# Altium schematic symbol library Lab4_Altium_Files.SCHLIB: 90 symbols (part 2 of 2)
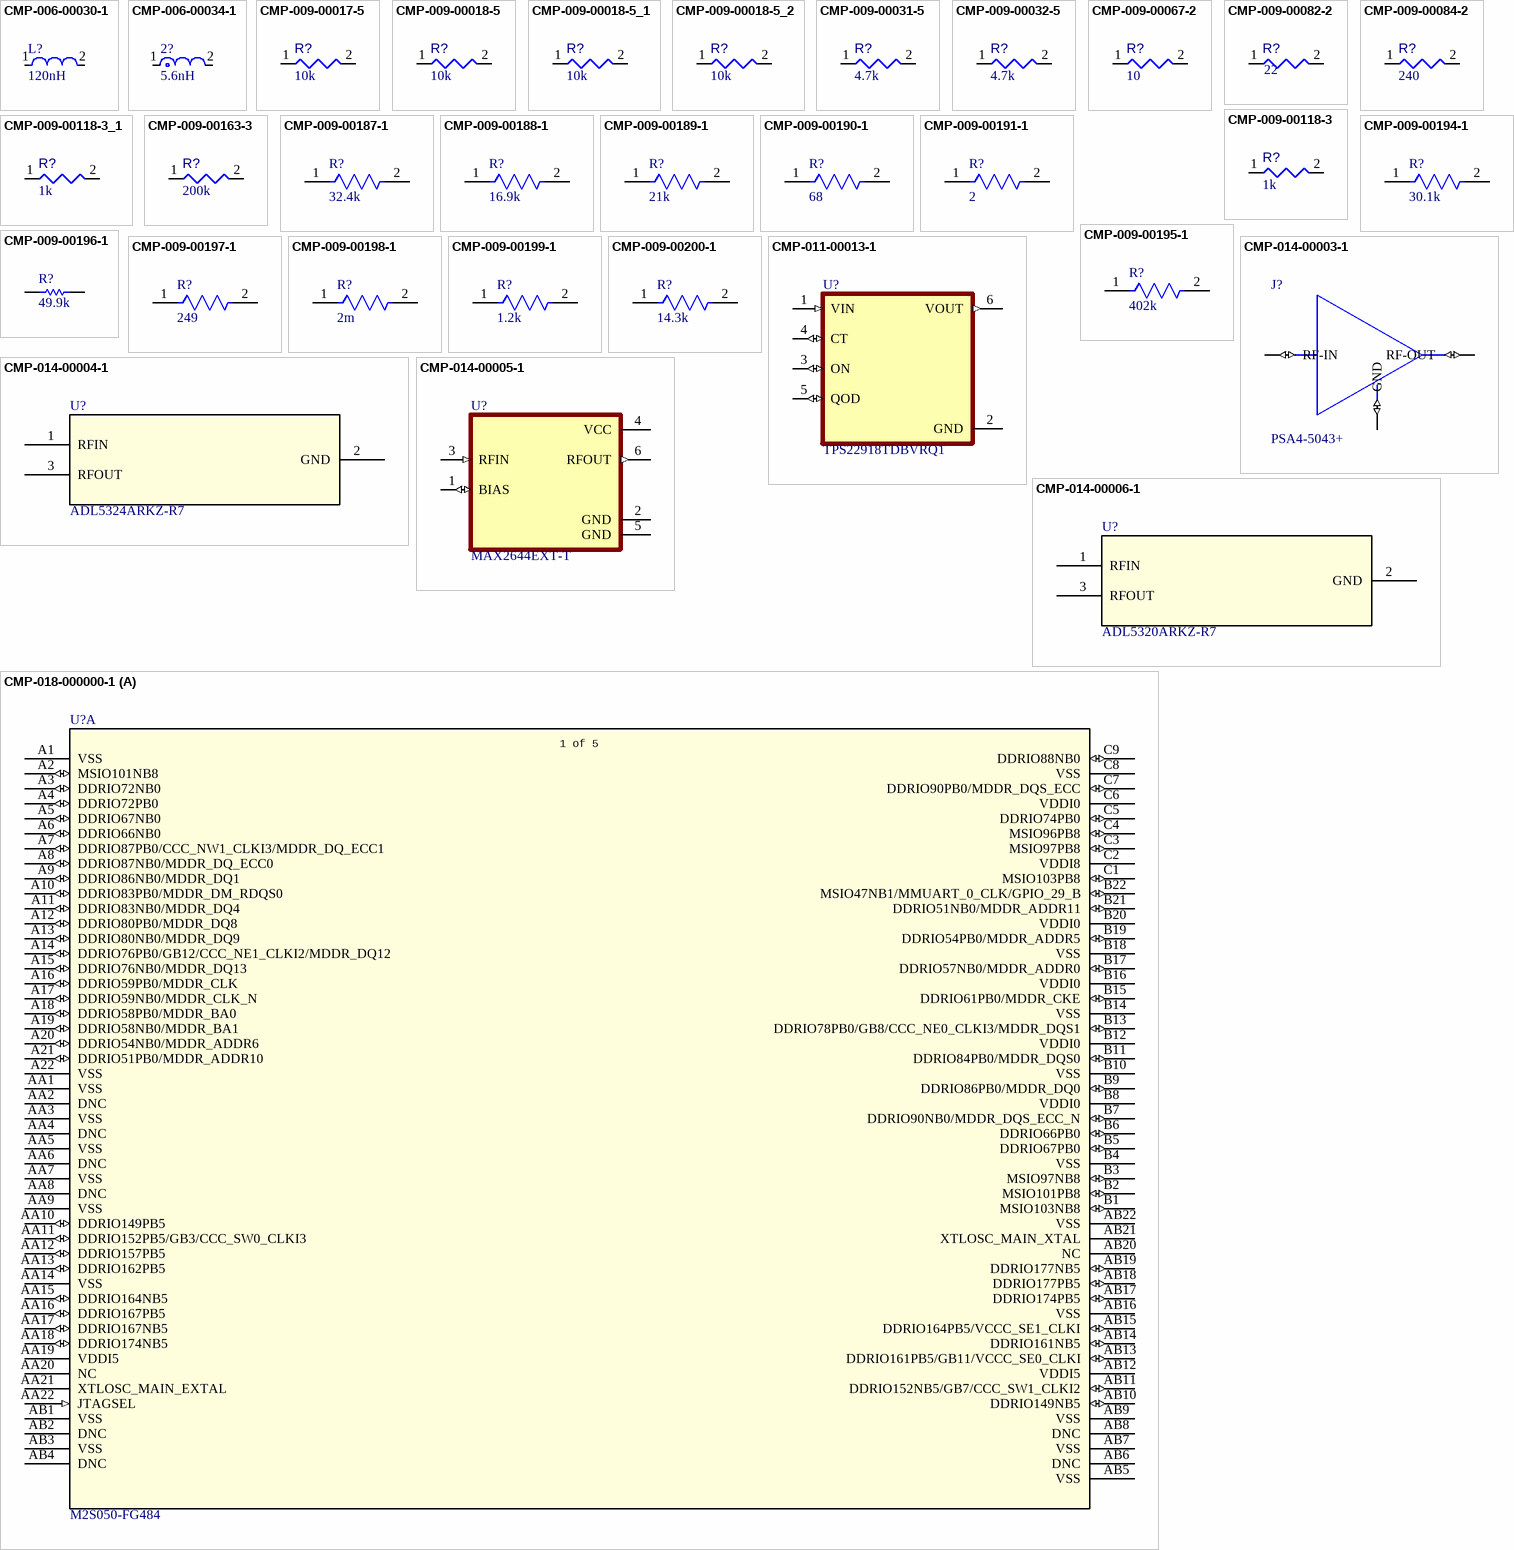
[diagram p8: symbols CMP-006-00030-1 to CMP-018-000000-1]

## CMP-009-00195-1
designator R?, comment value 402k  (hidden comment: res 402k 0805)
Fixed Resistor, Metal Glaze/Thick Film, 0.125W, 402000ohm, 150V, 1% +/-Tol, Surface Mount, 0805; Manufacturer Package Identifier: 0805 (2012 metric); Power Rating: 125mW; Temperature Coefficient: 100ppm/°C; Tolerance: 1%; Working Voltage: 150V; Ratings: AEC-Q200; Number of Terminations: 2; Max Operating Temperature: 155°C; Width: 1.25mm; Case Code (Metric): 2012; Case Code (Imperial): 0805; Mounting Technology: Surface Mount; Composition: Thick Film; Case/Package: 0805; Max Power Dissipation: 125mW; REACH SVHC: Unaffected; Lifecycle Status: Production; Min Operating Temperature: -55°C; RoHS: Compliant; Height: 500µm; Features: Automotive AEC-Q200, Moisture Resistant; Number of Terminals: 2; Length: 2mm; Export Control Classification Number (ECCN) Code: EAR99; China RoHS: Non-Compliant; Introduction Date: 2012-04-10; Harmonized Tariff Schedule (HTS) Code: 8533.21.00.30; Packaging: Tape & Reel; Termination: SMD/SMT; Voltage Rating: 150V; Country of Origin: Mainland China, Taiwan
footprint FP-AC0805-IPC_A
footprint FP-AC0805-IPC_C
footprint FP-AC0805-MFG
footprint FP-AC0805-IPC_B
pins: 1, 2

## CMP-009-00196-1
designator R?, comment value 49.9k  (hidden comment: res 49.9k)
Res Thick Film 0201 49.9K Ohm 1% 1/20W ±200ppm/°C Molded SMD SMD T/R; Manufacturer Lifecycle Status: ACTIVE; Part Series: Precision Thick Film Chip Resistors; Max Power Dissipation: 50mW; Voltage Rating: 25V; REACH SVHC: Unaffected; Radiation Hardening: No; Lifecycle Status: Production; Max Operating Temperature: 125°C; RoHS: Compliant; Case Code (Imperial): 0201; Composition: Thick Film; Lead Free: Lead Free; Working Voltage: 25V; Case/Package: 0201; Power Rating: 50mW; Tolerance: 1%; Termination: SMD/SMT; Mounting Technology: Surface Mount; Schedule B: 8533210045, 8533210045; Number of Terminations: 2; Temperature Coefficient: 200ppm/°C; Number of Terminals: 2; Length: 600µm; Min Operating Temperature: -55°C; Contact Plating: Tin; Case Code (Metric): 0603; Height: 230µm; Width: 300µm
footprint RESC0603X26X15NL03T05 (Chip Resistor, 2-Leads, Body 0.60x0.30mm, IPC Medium Density)
footprint RESC0603X26X15ML03T05 (Chip Resistor, 2-Leads, Body 0.60x0.30mm, IPC Low Density)
footprint RESC0603X26X15LL03T05 (Chip Resistor, 2-Leads, Body 0.60x0.30mm, IPC High Density)
pins: 1, 2
1 alternate drawing of the same symbol

## CMP-009-00197-1
designator R?, comment value 249  (hidden comment: res 249 0603)
100mW Thin Film Resistor 75V ±25ppm/℃ ±0.1% 249Ω 0603 Chip Resistor - Surface Mount ROHS; Temperature Coefficient: 25ppm/°C; Voltage Rating (DC): 50V; Case Code (Imperial): 0603; RoHS: Compliant; Max Operating Temperature: 155°C; Country of Origin: Mainland China, Taiwan; Mounting Technology: Surface Mount; Export Control Classification Number (ECCN) Code: EAR99; Introduction Date: 2008-06-09; Number of Terminations: 2; REACH SVHC: Unaffected; Tolerance: 0.1%; Depth: 800µm; Schedule B: 8533210045, 8533210045; Lifecycle Status: Production; Number of Terminals: 2; Working Voltage: 75V; Max Power Dissipation: 100mW; Radiation Hardening: No; Harmonized Tariff Schedule (HTS) Code: 8533.21.00.30; Military Standard: Not; Power Rating: 100mW; Height: 450µm; Contact Plating: Tin; Voltage Rating: 75V; Width: 800µm; Case/Package: 0603; Composition: Thin Film; China RoHS: Non-Compliant; Length: 1.6mm; Features: Moisture Resistant; Lead Free: Lead Free; Min Operating Temperature: -55°C; Termination: SMD/SMT
footprint FP-RT0603-IPC_C
footprint FP-RT0603-IPC_B
footprint FP-RT0603-IPC_A
footprint FP-RT0603-MFG
pins: 1, 2

## CMP-009-00198-1
designator R?, comment value 2m  (hidden comment: res 0.02 0603)
Res Thick Film 0603 0.02 Ohm 1% 0.125W ±300ppm/°C Molded SMD Paper T/R; Power Rating: 125mW; Working Voltage: 50mV; Temperature Coefficient: 300ppm/°C; Lead Free: Lead Free; Tolerance: 1%; Mounting Technology: Surface Mount; REACH SVHC: Unaffected; Packaging: Tape & Reel (TR); Case Code (Metric): 1608; Length: 1.6mm; Case/Package: 0603; Number of Terminations: 2; Height: 450µm; Min Operating Temperature: -55°C; Composition: Thick Film; Case Code (Imperial): 0603; RoHS: Compliant; Lifecycle Status: Production; Number of Terminals: 2; Schedule B: 8533210045, 8533210045; China RoHS: Non-Compliant; Width: 800µm; Max Power Dissipation: 125mW; Max Operating Temperature: 155°C
footprint FP-CSR0603-IPC_B
footprint FP-CSR0603-MFG
footprint FP-CSR0603-IPC_C
footprint FP-CSR0603-IPC_A
pins: 1, 2

## CMP-009-00199-1
designator R?, comment value 1.2k  (hidden comment: res 1.2k 0805)
Fixed Resistor, Metal Glaze/thick Film, 0.125W, 1200ohm, 500V, 1% +/-Tol, 100ppm/Cel, Surface Mount, 0805; Temperature Coefficient: 100ppm/°C; Voltage Rating: 150V; Power Rating: 125mW; Case/Package: 0805; Lifecycle Status: Production; Packaging: Tape & Reel; Working Voltage: 500V; Length: 2mm; Min Operating Temperature: -55°C; Tolerance: 1%; Introduction Date: 2017-10-02; Ratings: AEC-Q200; Height: 500µm; Export Control Classification Number (ECCN) Code: EAR99; Harmonized Tariff Schedule (HTS) Code: 8533.21.00.30; Composition: Thick Film; Number of Terminals: 2; RoHS: Compliant; Mounting Technology: Surface Mount; Max Operating Temperature: 155°C; REACH SVHC: Unaffected; China RoHS: Non-Compliant; Country of Origin: Mainland China, Taiwan; Width: 1.25mm
footprint FP-SR0805-MFG
footprint FP-SR0805-IPC_A
footprint FP-SR0805-IPC_B
footprint FP-SR0805-IPC_C
pins: 1, 2

## CMP-009-00200-1
designator R?, comment value 14.3k  (hidden comment: res 14.3k 0603)
Fixed Resistor, Thin Film, 0.1W, 14300ohm, 75V, 0.1% +/-Tol, 25ppm/Cel, Surface Mount, 0603; Temperature Coefficient: 25ppm/°C; Voltage Rating (DC): 50V; Power Rating: 100mW; Case/Package: 0603; Width: 800µm; Country of Origin: Mainland China, Taiwan; RoHS: Compliant; Mounting Technology: Surface Mount; Max Operating Temperature: 155°C; Tolerance: 0.1%; Height: 450µm; China RoHS: Non-Compliant; Introduction Date: 2008-06-09; Weight: 2.012816mg; Number of Terminations: 2; Case Code (Imperial): 0603; Min Operating Temperature: -55°C; Composition: Thin Film; Working Voltage: 75V; Voltage Rating: 75V; Termination: SMD/SMT; Export Control Classification Number (ECCN) Code: EAR99; Lifecycle Status: Production; Length: 1.6mm; REACH SVHC: Unaffected; Lead Free: Lead Free; Features: Moisture Resistant; Max Power Dissipation: 100mW; Harmonized Tariff Schedule (HTS) Code: 8533.21.00.30; Number of Terminals: 2
footprint FP-RT0603-IPC_C
footprint FP-RT0603-IPC_B
footprint FP-RT0603-IPC_A
footprint FP-RT0603-MFG
pins: 1, 2

## CMP-011-00013-1
designator U?, comment TPS22918TDBVRQ1
1-ch, 5.5-V, 2-A, 52-mÎ© automotive load switch with adj. rise time and adj. output discharg; MF: Texas Instruments; SnapEDA_Link: https://www.snapeda.com/parts/TPS22918TDBVRQ1/Texas+Instruments/view-part/?ref=snap; Source: TPS22918TDBVRQ1.SchLib; Pins: 6; Component Type: Standard; Value: *; Design Item ID: TPS22918TDBVRQ1; Case/Package: SOT-23-6 Texas Instruments; Check_prices: https://www.snapeda.com/parts/TPS22918TDBVRQ1/Texas+Instruments/view-part/?ref=eda; MP: TPS22918TDBVRQ1
footprint SOT95P280X145-6N
pins: 1 VIN (in), 2 GND (power), 3 ON (io), 4 CT (io), 5 QOD (io), 6 VOUT (out)

## CMP-014-00003-1
designator J?, comment PSA4-5043+
RF Amplifier IC Cellular, GSM, GPS, ISM, LTE, WCDMA, WiMAX, WLAN 50MHz ~ 4GHz MMM1362; MF: Mini-Circuits; Component Type: Standard; Design Item ID: PSA4-5043+; Pins: 4; Case/Package: None; SnapEDA_Link: https://www.snapeda.com/parts/PSA4-5043+/Mini-Circuits/view-part/?ref=snap; Source: PSA4-5043+.SchLib; Check_prices: https://www.snapeda.com/parts/PSA4-5043+/Mini-Circuits/view-part/?ref=eda; Value: *; MP: PSA4-5043+; Component Type: Amplifiers
footprint PSA4-5043+
pins: 1 RF-OUT (io), 2 GND (io), 3 RF-IN (io), 4 GND (io)

## CMP-014-00004-1
designator U?, comment ADL5324ARKZ-R7
400 MHz TO 4000 MHz Â½ Watt RF Driver Amplifier; Manufacturer_Name: Analog Devices Inc; Datasheet: https://www.analog.com/media/en/technical-documentation/data-sheets/ADL5324.pdf; Copyright: Copyright (C) 2026 Ultra Librarian. All rights reserved.; RefDes: RefDes; Manufacturer_Part_Number: ADL5324ARKZ-R7; Source: ADL5324ARKZ-R7.SchLib; Design Item ID: ADL5324ARKZ-R7; Type: Type
footprint RK_3_ADI
pins: 1 RFIN, 2 GND, 3 RFOUT

## CMP-014-00005-1
designator U?, comment MAX2644EXT-T
2.4GHz SiGe, High IP3 Low-Noise Amplifier; MF: Analog Devices; MP: MAX2644EXT+T; SnapEDA_Link: https://www.snapeda.com/parts/MAX2644EXT+T/Analog+Devices/view-part/?ref=snap; Source: MAX2644EXT-T.SchLib; Value: *; Check_prices: https://www.snapeda.com/parts/MAX2644EXT+T/Analog+Devices/view-part/?ref=eda; Case/Package: SC-70-6 Maxim; Design Item ID: MAX2644EXT-T; Component Type: Standard; Pins: 6
footprint SOT65P217X110-6N
pins: 1 BIAS (io), 2 GND (power), 3 RFIN (in), 4 VCC (power), 5 GND (power), 6 RFOUT (out)

## CMP-014-00006-1
designator U?, comment ADL5320ARKZ-R7
400 MHz TO 2700 MHz Â¼ Watt RF Driver Amplifier; Manufacturer_Name: Analog Devices Inc; Copyright: Copyright (C) 2026 Ultra Librarian. All rights reserved.; Source: ADL5320ARKZ-R7.SchLib; Type: Type; Design Item ID: ADL5320ARKZ-R7; RefDes: RefDes; Manufacturer_Part_Number: ADL5320ARKZ-R7
footprint RK_3_ADI
pins: 1 RFIN, 2 GND, 3 RFOUT

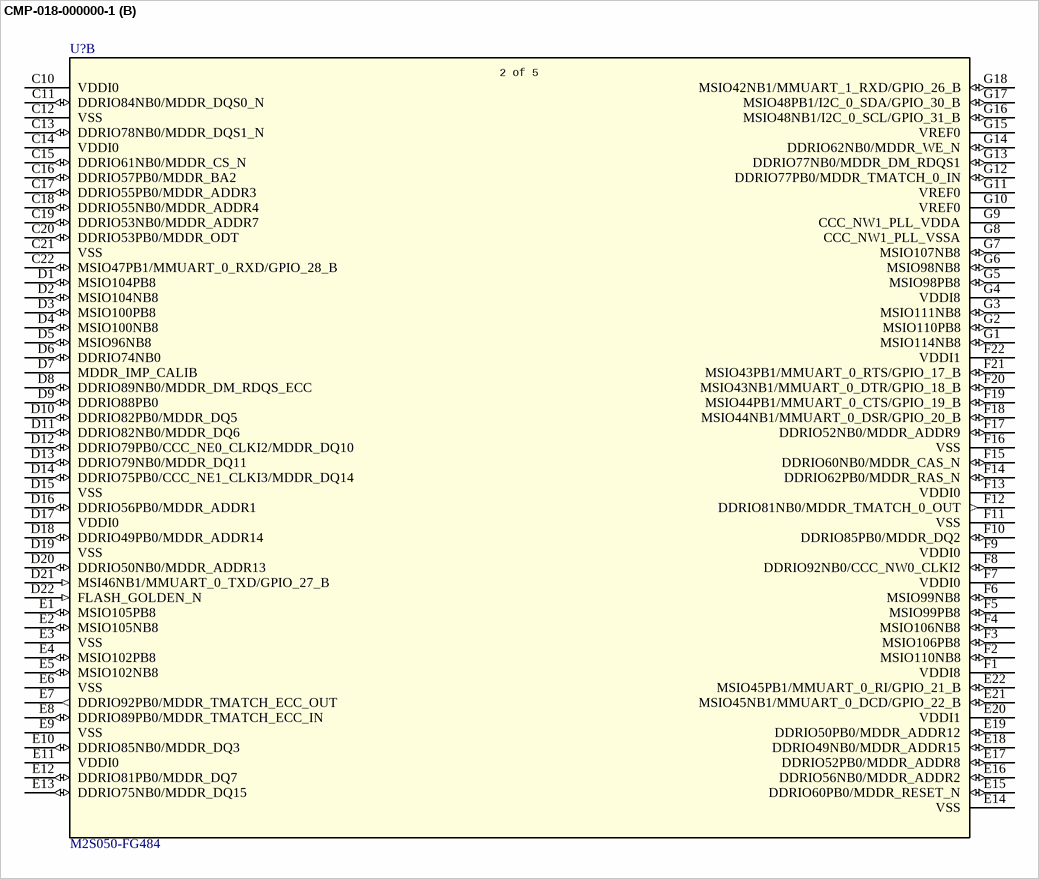
[diagram p2: symbol CMP-018-000000-1]

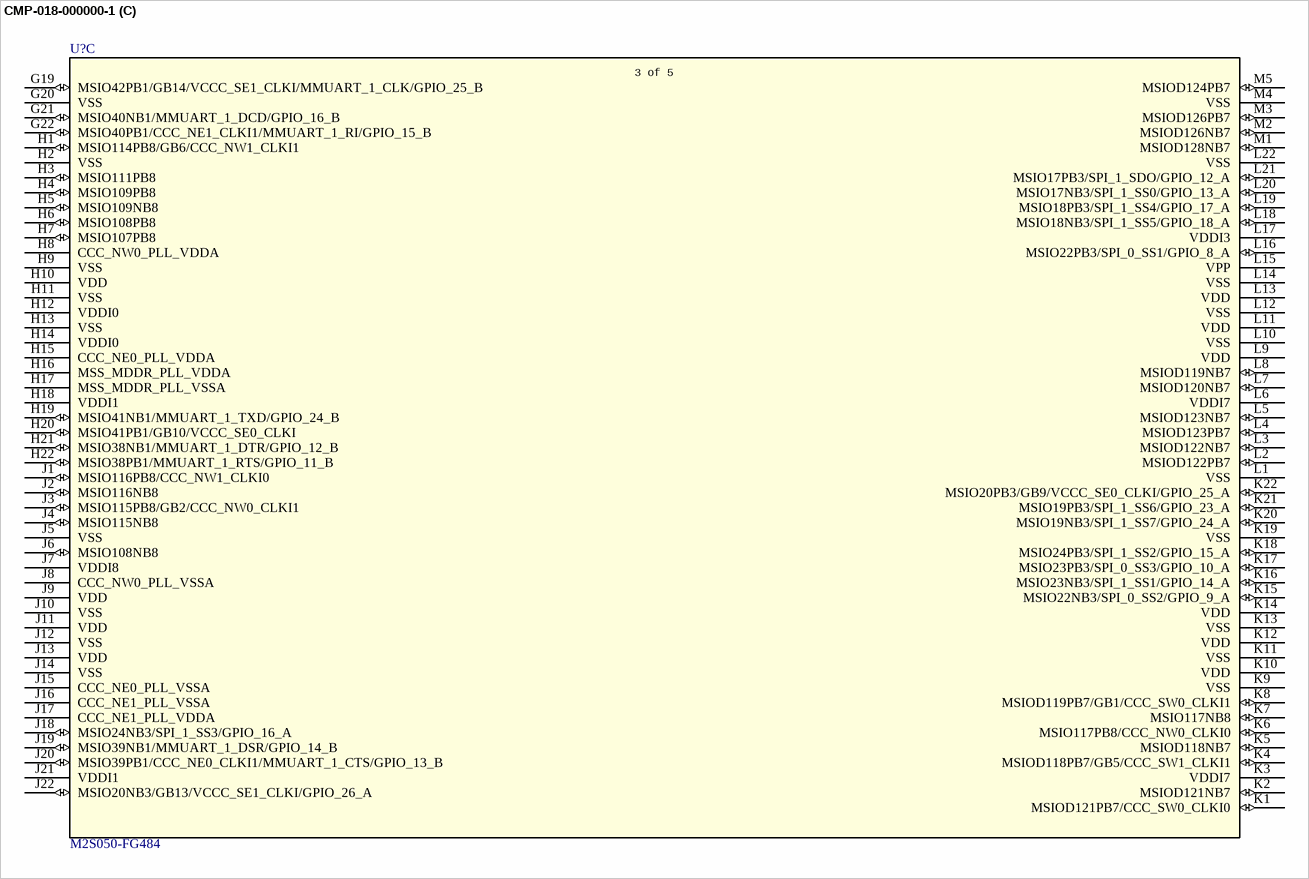
[diagram p3: symbol CMP-018-000000-1]

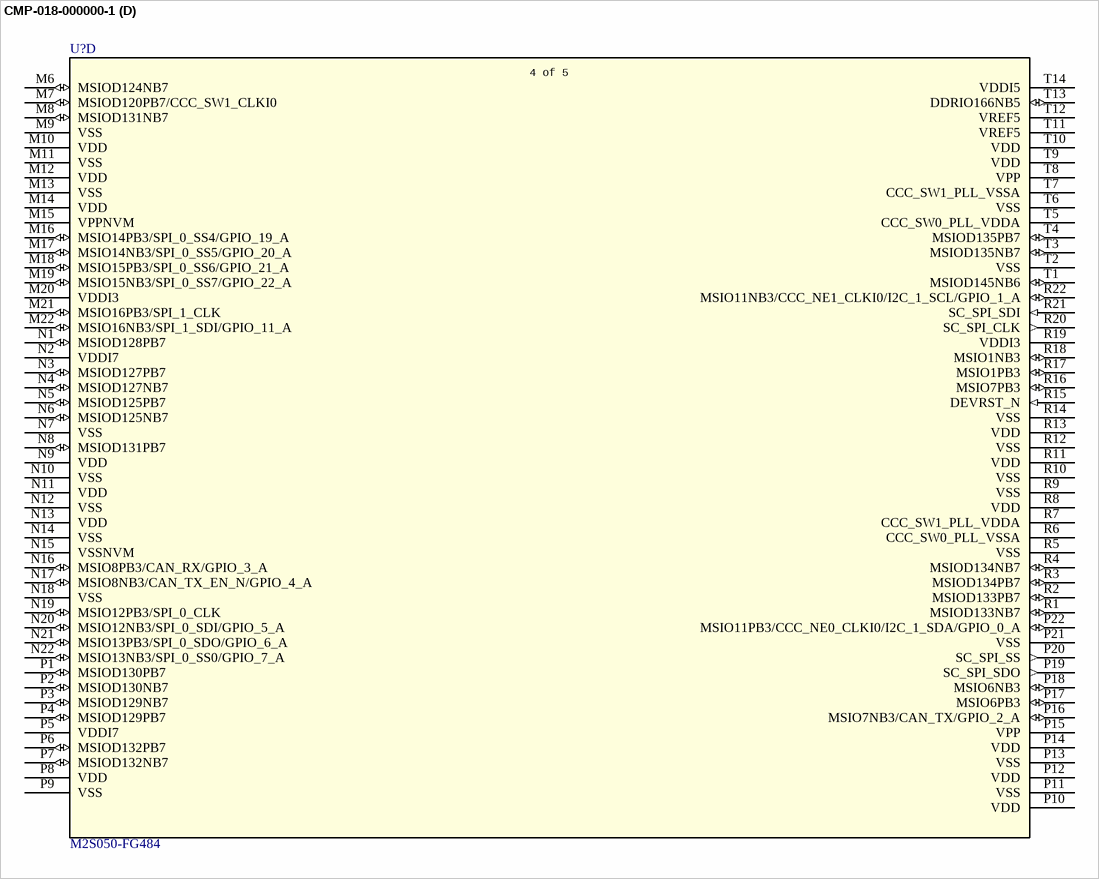
[diagram p4: symbol CMP-018-000000-1]

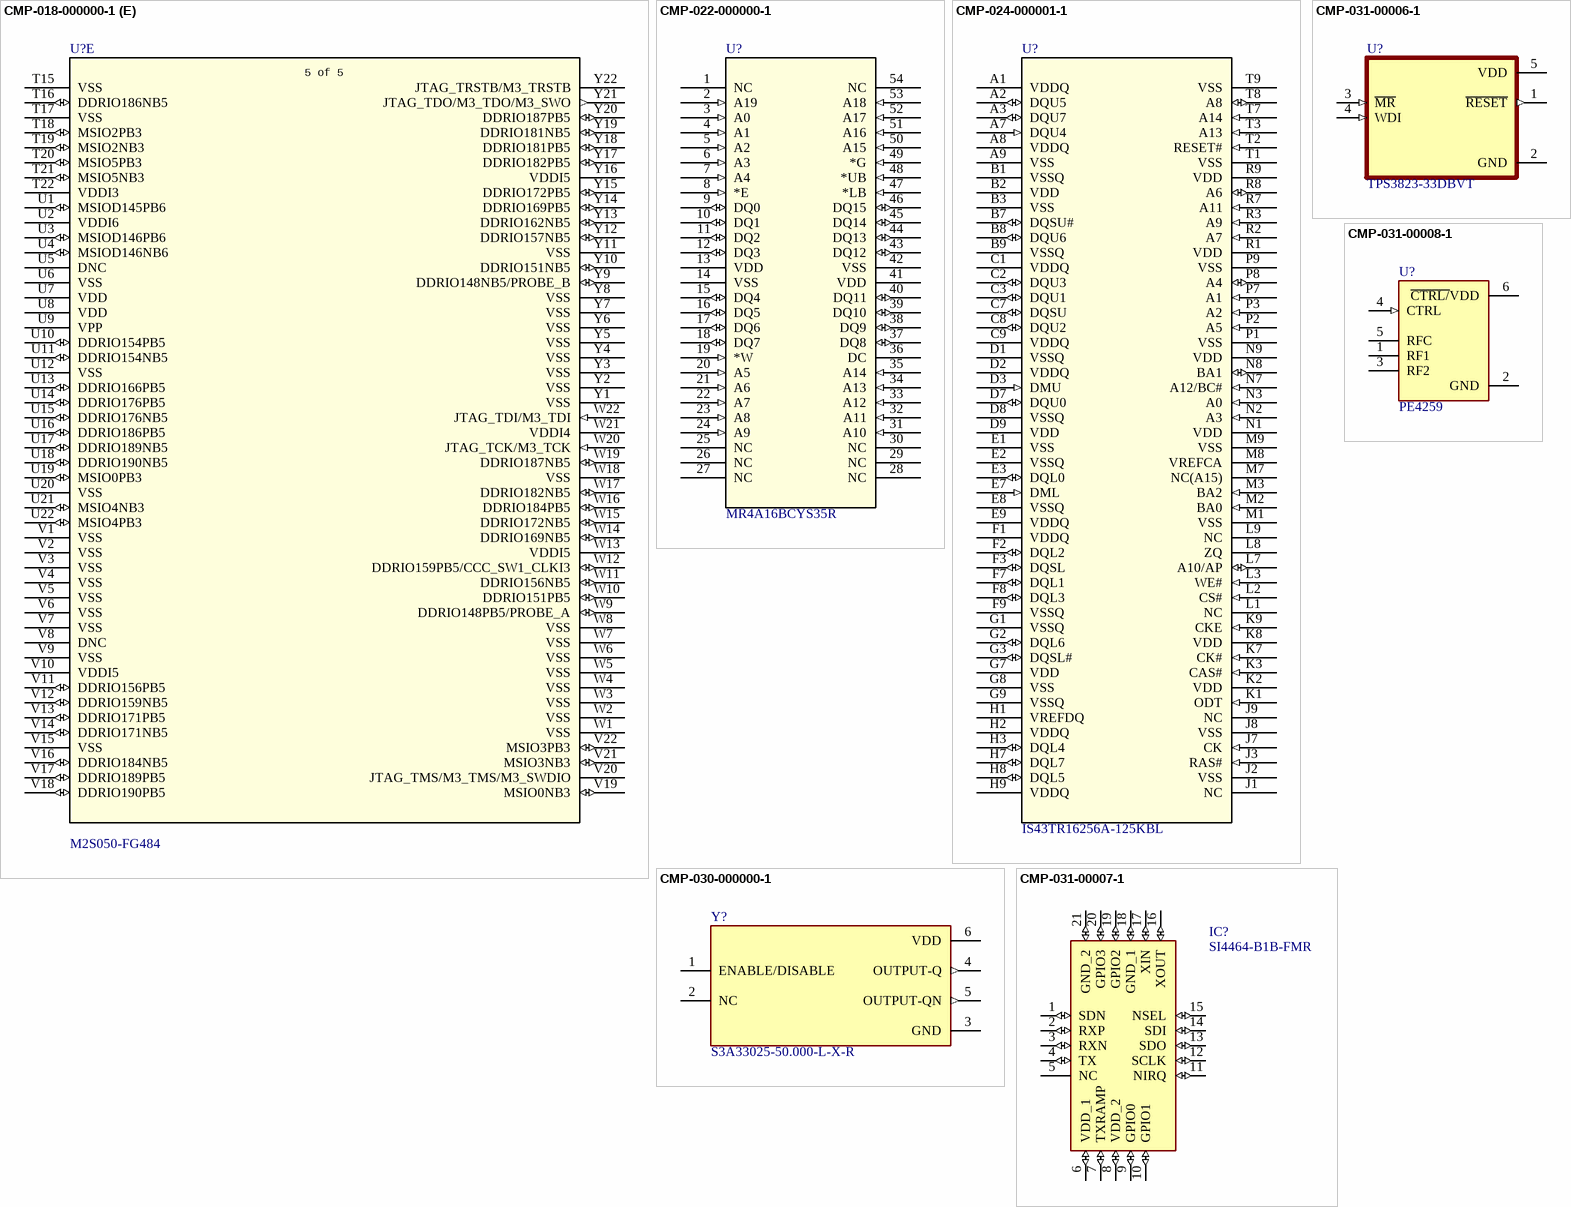
[diagram p5: symbols CMP-018-000000-1 to CMP-031-00008-1]

## CMP-018-000000-1
designator U?, comment M2S050-FG484
Description; Manufacturer_Name: Microchip; Design Item ID: M2S050-FG484; RefDes: RefDes; Copyright: Copyright (C) 2025 Ultra Librarian. All rights reserved.; Type: Embedded; Manufacturer_Part_Number: M2S050-FG484; Source: M2S050-FG484.SchLib
footprint FG484_MS-034_VAR_AAJ-1_MCH
part A pins: A1 VSS (power), A2 MSIO101NB8 (io), A3 DDRIO72NB0 (io), A4 DDRIO72PB0 (io), A5 DDRIO67NB0 (io), A6 DDRIO66NB0 (io), A7 DDRIO87PB0/CCC_NW1_CLKI3/MDDR_DQ_ECC1 (io), A8 DDRIO87NB0/MDDR_DQ_ECC0 (io), A9 DDRIO86NB0/MDDR_DQ1 (io), A10 DDRIO83PB0/MDDR_DM_RDQS0 (io), A11 DDRIO83NB0/MDDR_DQ4 (io), A12 DDRIO80PB0/MDDR_DQ8 (io), A13 DDRIO80NB0/MDDR_DQ9 (io), A14 DDRIO76PB0/GB12/CCC_NE1_CLKI2/MDDR_DQ12 (io), A15 DDRIO76NB0/MDDR_DQ13 (io), A16 DDRIO59PB0/MDDR_CLK (io), A17 DDRIO59NB0/MDDR_CLK_N (io), A18 DDRIO58PB0/MDDR_BA0 (io), A19 DDRIO58NB0/MDDR_BA1 (io), A20 DDRIO54NB0/MDDR_ADDR6 (io), A21 DDRIO51PB0/MDDR_ADDR10 (io), A22 VSS (power), AA1 VSS (power), AA2 DNC, AA3 VSS (power), AA4 DNC, AA5 VSS (power), AA6 DNC, AA7 VSS (power), AA8 DNC, AA9 VSS (power), AA10 DDRIO149PB5 (io), AA11 DDRIO152PB5/GB3/CCC_SW0_CLKI3 (io), AA12 DDRIO157PB5 (io), AA13 DDRIO162PB5 (io), AA14 VSS (power), AA15 DDRIO164NB5 (io), AA16 DDRIO167PB5 (io), AA17 DDRIO167NB5 (io), AA18 DDRIO174NB5 (io), AA19 VDDI5 (power), AA20 NC, AA21 XTLOSC_MAIN_EXTAL, AA22 JTAGSEL (in), AB1 VSS (power), AB2 DNC, AB3 VSS (power), AB4 DNC, AB5 VSS (power), AB6 DNC, AB7 VSS (power), AB8 DNC, AB9 VSS (power), AB10 DDRIO149NB5 (io), AB11 DDRIO152NB5/GB7/CCC_SW1_CLKI2 (io), AB12 VDDI5 (power), AB13 DDRIO161PB5/GB11/VCCC_SE0_CLKI (io), AB14 DDRIO161NB5 (io), AB15 DDRIO164PB5/VCCC_SE1_CLKI (io), AB16 VSS (power), AB17 DDRIO174PB5 (io), AB18 DDRIO177PB5 (io), AB19 DDRIO177NB5 (io), AB20 NC, AB21 XTLOSC_MAIN_XTAL, AB22 VSS (power), B1 MSIO103NB8 (io), B2 MSIO101PB8 (io), B3 MSIO97NB8 (io), B4 VSS (power), B5 DDRIO67PB0 (io), B6 DDRIO66PB0 (io), B7 DDRIO90NB0/MDDR_DQS_ECC_N (io), B8 VDDI0 (power), B9 DDRIO86PB0/MDDR_DQ0 (io), B10 VSS (power), B11 DDRIO84PB0/MDDR_DQS0 (io), B12 VDDI0 (power), B13 DDRIO78PB0/GB8/CCC_NE0_CLKI3/MDDR_DQS1 (io), B14 VSS (power), B15 DDRIO61PB0/MDDR_CKE (io), B16 VDDI0 (power), B17 DDRIO57NB0/MDDR_ADDR0 (io), B18 VSS (power), B19 DDRIO54PB0/MDDR_ADDR5 (io), B20 VDDI0 (power), B21 DDRIO51NB0/MDDR_ADDR11 (io), B22 MSIO47NB1/MMUART_0_CLK/GPIO_29_B (io), C1 MSIO103PB8 (io), C2 VDDI8 (power), C3 MSIO97PB8 (io), C4 MSIO96PB8 (io), C5 DDRIO74PB0 (io), C6 VDDI0 (power), C7 DDRIO90PB0/MDDR_DQS_ECC (io), C8 VSS (power), C9 DDRIO88NB0 (io)
part B pins: C10 VDDI0 (power), C11 DDRIO84NB0/MDDR_DQS0_N (io), C12 VSS (power), C13 DDRIO78NB0/MDDR_DQS1_N (io), C14 VDDI0 (power), C15 DDRIO61NB0/MDDR_CS_N (io), C16 DDRIO57PB0/MDDR_BA2 (io), C17 DDRIO55PB0/MDDR_ADDR3 (io), C18 DDRIO55NB0/MDDR_ADDR4 (io), C19 DDRIO53NB0/MDDR_ADDR7 (io), C20 DDRIO53PB0/MDDR_ODT (io), C21 VSS (power), C22 MSIO47PB1/MMUART_0_RXD/GPIO_28_B (io), D1 MSIO104PB8 (io), D2 MSIO104NB8 (io), D3 MSIO100PB8 (io), D4 MSIO100NB8 (io), D5 MSIO96NB8 (io), D6 DDRIO74NB0 (io), D7 MDDR_IMP_CALIB, D8 DDRIO89NB0/MDDR_DM_RDQS_ECC (io), D9 DDRIO88PB0 (io), D10 DDRIO82PB0/MDDR_DQ5 (io), D11 DDRIO82NB0/MDDR_DQ6 (io), D12 DDRIO79PB0/CCC_NE0_CLKI2/MDDR_DQ10 (io), D13 DDRIO79NB0/MDDR_DQ11 (io), D14 DDRIO75PB0/CCC_NE1_CLKI3/MDDR_DQ14 (io), D15 VSS (power), D16 DDRIO56PB0/MDDR_ADDR1 (io), D17 VDDI0 (power), D18 DDRIO49PB0/MDDR_ADDR14 (io), D19 VSS (power), D20 DDRIO50NB0/MDDR_ADDR13 (io), D21 MSI46NB1/MMUART_0_TXD/GPIO_27_B (in), D22 FLASH_GOLDEN_N (in), E1 MSIO105PB8 (io), E2 MSIO105NB8 (io), E3 VSS (power), E4 MSIO102PB8 (io), E5 MSIO102NB8 (io), E6 VSS (power), E7 DDRIO92PB0/MDDR_TMATCH_ECC_OUT (out), E8 DDRIO89PB0/MDDR_TMATCH_ECC_IN (io), E9 VSS (power), E10 DDRIO85NB0/MDDR_DQ3 (io), E11 VDDI0 (power), E12 DDRIO81PB0/MDDR_DQ7 (io), E13 DDRIO75NB0/MDDR_DQ15 (io), E14 VSS (power), E15 DDRIO60PB0/MDDR_RESET_N (io), E16 DDRIO56NB0/MDDR_ADDR2 (io), E17 DDRIO52PB0/MDDR_ADDR8 (io), E18 DDRIO49NB0/MDDR_ADDR15 (io), E19 DDRIO50PB0/MDDR_ADDR12 (io), E20 VDDI1 (power), E21 MSIO45NB1/MMUART_0_DCD/GPIO_22_B (io), E22 MSIO45PB1/MMUART_0_RI/GPIO_21_B (io), F1 VDDI8 (power), F2 MSIO110NB8 (io), F3 MSIO106PB8 (io), F4 MSIO106NB8 (io), F5 MSIO99PB8 (io), F6 MSIO99NB8 (io), F7 VDDI0 (power), F8 DDRIO92NB0/CCC_NW0_CLKI2 (io), F9 VDDI0 (power), F10 DDRIO85PB0/MDDR_DQ2 (io), F11 VSS (power), F12 DDRIO81NB0/MDDR_TMATCH_0_OUT (out), F13 VDDI0 (power), F14 DDRIO62PB0/MDDR_RAS_N (io), F15 DDRIO60NB0/MDDR_CAS_N (io), F16 VSS (power), F17 DDRIO52NB0/MDDR_ADDR9 (io), F18 MSIO44NB1/MMUART_0_DSR/GPIO_20_B (io), F19 MSIO44PB1/MMUART_0_CTS/GPIO_19_B (io), F20 MSIO43NB1/MMUART_0_DTR/GPIO_18_B (io), F21 MSIO43PB1/MMUART_0_RTS/GPIO_17_B (io), F22 VDDI1 (power), G1 MSIO114NB8 (io), G2 MSIO110PB8 (io), G3 MSIO111NB8 (io), G4 VDDI8 (power), G5 MSIO98PB8 (io), G6 MSIO98NB8 (io), G7 MSIO107NB8 (io), G8 CCC_NW1_PLL_VSSA (power), G9 CCC_NW1_PLL_VDDA (power), G10 VREF0 (power), G11 VREF0 (power), G12 DDRIO77PB0/MDDR_TMATCH_0_IN (io), G13 DDRIO77NB0/MDDR_DM_RDQS1 (io), G14 DDRIO62NB0/MDDR_WE_N (io), G15 VREF0 (power), G16 MSIO48NB1/I2C_0_SCL/GPIO_31_B (io), G17 MSIO48PB1/I2C_0_SDA/GPIO_30_B (io), G18 MSIO42NB1/MMUART_1_RXD/GPIO_26_B (io)
part C pins: G19 MSIO42PB1/GB14/VCCC_SE1_CLKI/MMUART_1_CLK/GPIO_25_B (io), G20 VSS (power), G21 MSIO40NB1/MMUART_1_DCD/GPIO_16_B (io), G22 MSIO40PB1/CCC_NE1_CLKI1/MMUART_1_RI/GPIO_15_B (io), H1 MSIO114PB8/GB6/CCC_NW1_CLKI1 (io), H2 VSS (power), H3 MSIO111PB8 (io), H4 MSIO109PB8 (io), H5 MSIO109NB8 (io), H6 MSIO108PB8 (io), H7 MSIO107PB8 (io), H8 CCC_NW0_PLL_VDDA (power), H9 VSS (power), H10 VDD (power), H11 VSS (power), H12 VDDI0 (power), H13 VSS (power), H14 VDDI0 (power), H15 CCC_NE0_PLL_VDDA (power), H16 MSS_MDDR_PLL_VDDA (power), H17 MSS_MDDR_PLL_VSSA (power), H18 VDDI1 (power), H19 MSIO41NB1/MMUART_1_TXD/GPIO_24_B (io), H20 MSIO41PB1/GB10/VCCC_SE0_CLKI (io), H21 MSIO38NB1/MMUART_1_DTR/GPIO_12_B (io), H22 MSIO38PB1/MMUART_1_RTS/GPIO_11_B (io), J1 MSIO116PB8/CCC_NW1_CLKI0 (io), J2 MSIO116NB8 (io), J3 MSIO115PB8/GB2/CCC_NW0_CLKI1 (io), J4 MSIO115NB8 (io), J5 VSS (power), J6 MSIO108NB8 (io), J7 VDDI8 (power), J8 CCC_NW0_PLL_VSSA (power), J9 VDD (power), J10 VSS (power), J11 VDD (power), J12 VSS (power), J13 VDD (power), J14 VSS (power), J15 CCC_NE0_PLL_VSSA (power), J16 CCC_NE1_PLL_VSSA (power), J17 CCC_NE1_PLL_VDDA (power), J18 MSIO24NB3/SPI_1_SS3/GPIO_16_A (io), J19 MSIO39NB1/MMUART_1_DSR/GPIO_14_B (io), J20 MSIO39PB1/CCC_NE0_CLKI1/MMUART_1_CTS/GPIO_13_B (io), J21 VDDI1 (power), J22 MSIO20NB3/GB13/VCCC_SE1_CLKI/GPIO_26_A (io), K1 MSIOD121PB7/CCC_SW0_CLKI0 (io), K2 MSIOD121NB7 (io), K3 VDDI7 (power), K4 MSIOD118PB7/GB5/CCC_SW1_CLKI1 (io), K5 MSIOD118NB7 (io), K6 MSIO117PB8/CCC_NW0_CLKI0 (io), K7 MSIO117NB8 (io), K8 MSIOD119PB7/GB1/CCC_SW0_CLKI1 (io), K9 VSS (power), K10 VDD (power), K11 VSS (power), K12 VDD (power), K13 VSS (power), K14 VDD (power), K15 MSIO22NB3/SPI_0_SS2/GPIO_9_A (io), K16 MSIO23NB3/SPI_1_SS1/GPIO_14_A (io), K17 MSIO23PB3/SPI_0_SS3/GPIO_10_A (io), K18 MSIO24PB3/SPI_1_SS2/GPIO_15_A (io), K19 VSS (power), K20 MSIO19NB3/SPI_1_SS7/GPIO_24_A (io), K21 MSIO19PB3/SPI_1_SS6/GPIO_23_A (io), K22 MSIO20PB3/GB9/VCCC_SE0_CLKI/GPIO_25_A (io), L1 VSS (power), L2 MSIOD122PB7 (io), L3 MSIOD122NB7 (io), L4 MSIOD123PB7 (io), L5 MSIOD123NB7 (io), L6 VDDI7 (power), L7 MSIOD120NB7 (io), L8 MSIOD119NB7 (io), L9 VDD (power), L10 VSS (power), L11 VDD (power), L12 VSS (power), L13 VDD (power), L14 VSS (power), L15 VPP (power), L16 MSIO22PB3/SPI_0_SS1/GPIO_8_A (io), L17 VDDI3 (power), L18 MSIO18NB3/SPI_1_SS5/GPIO_18_A (io), L19 MSIO18PB3/SPI_1_SS4/GPIO_17_A (io), L20 MSIO17NB3/SPI_1_SS0/GPIO_13_A (io), L21 MSIO17PB3/SPI_1_SDO/GPIO_12_A (io), L22 VSS (power), M1 MSIOD128NB7 (io), M2 MSIOD126NB7 (io), M3 MSIOD126PB7 (io), M4 VSS (power), M5 MSIOD124PB7 (io)
part D pins: M6 MSIOD124NB7 (io), M7 MSIOD120PB7/CCC_SW1_CLKI0 (io), M8 MSIOD131NB7 (io), M9 VSS (power), M10 VDD (power), M11 VSS (power), M12 VDD (power), M13 VSS (power), M14 VDD (power), M15 VPPNVM (power), M16 MSIO14PB3/SPI_0_SS4/GPIO_19_A (io), M17 MSIO14NB3/SPI_0_SS5/GPIO_20_A (io), M18 MSIO15PB3/SPI_0_SS6/GPIO_21_A (io), M19 MSIO15NB3/SPI_0_SS7/GPIO_22_A (io), M20 VDDI3 (power), M21 MSIO16PB3/SPI_1_CLK (io), M22 MSIO16NB3/SPI_1_SDI/GPIO_11_A (io), N1 MSIOD128PB7 (io), N2 VDDI7 (power), N3 MSIOD127PB7 (io), N4 MSIOD127NB7 (io), N5 MSIOD125PB7 (io), N6 MSIOD125NB7 (io), N7 VSS (power), N8 MSIOD131PB7 (io), N9 VDD (power), N10 VSS (power), N11 VDD (power), N12 VSS (power), N13 VDD (power), N14 VSS (power), N15 VSSNVM (power), N16 MSIO8PB3/CAN_RX/GPIO_3_A (io), N17 MSIO8NB3/CAN_TX_EN_N/GPIO_4_A (io), N18 VSS (power), N19 MSIO12PB3/SPI_0_CLK (io), N20 MSIO12NB3/SPI_0_SDI/GPIO_5_A (io), N21 MSIO13PB3/SPI_0_SDO/GPIO_6_A (io), N22 MSIO13NB3/SPI_0_SS0/GPIO_7_A (io), P1 MSIOD130PB7 (io), P2 MSIOD130NB7 (io), P3 MSIOD129NB7 (io), P4 MSIOD129PB7 (io), P5 VDDI7 (power), P6 MSIOD132PB7 (io), P7 MSIOD132NB7 (io), P8 VDD (power), P9 VSS (power), P10 VDD (power), P11 VSS (power), P12 VDD (power), P13 VSS (power), P14 VDD (power), P15 VPP (power), P16 MSIO7NB3/CAN_TX/GPIO_2_A (io), P17 MSIO6PB3 (io), P18 MSIO6NB3 (io), P19 SC_SPI_SDO (out), P20 SC_SPI_SS (out), P21 VSS (power), P22 MSIO11PB3/CCC_NE0_CLKI0/I2C_1_SDA/GPIO_0_A (io), R1 MSIOD133NB7 (io), R2 MSIOD133PB7 (io), R3 MSIOD134PB7 (io), R4 MSIOD134NB7 (io), R5 VSS (power), R6 CCC_SW0_PLL_VSSA (power), R7 CCC_SW1_PLL_VDDA (power), R8 VDD (power), R9 VSS (power), R10 VSS (power), R11 VDD (power), R12 VSS (power), R13 VDD (power), R14 VSS (power), R15 DEVRST_N (in), R16 MSIO7PB3 (io), R17 MSIO1PB3 (io), R18 MSIO1NB3 (io), R19 VDDI3 (power), R20 SC_SPI_CLK (out), R21 SC_SPI_SDI (in), R22 MSIO11NB3/CCC_NE1_CLKI0/I2C_1_SCL/GPIO_1_A (io), T1 MSIOD145NB6 (io), T2 VSS (power), T3 MSIOD135NB7 (io), T4 MSIOD135PB7 (io), T5 CCC_SW0_PLL_VDDA (power), T6 VSS (power), T7 CCC_SW1_PLL_VSSA (power), T8 VPP (power), T9 VDD (power), T10 VDD (power), T11 VREF5 (power), T12 VREF5 (power), T13 DDRIO166NB5 (io), T14 VDDI5 (power)
part E pins: T15 VSS (power), T16 DDRIO186NB5 (io), T17 VSS (power), T18 MSIO2PB3 (io), T19 MSIO2NB3 (io), T20 MSIO5PB3 (io), T21 MSIO5NB3 (io), T22 VDDI3 (power), U1 MSIOD145PB6 (io), U2 VDDI6 (power), U3 MSIOD146PB6 (io), U4 MSIOD146NB6 (io), U5 DNC, U6 VSS (power), U7 VDD (power), U8 VDD (power), U9 VPP (power), U10 DDRIO154PB5 (io), U11 DDRIO154NB5 (io), U12 VSS (power), U13 DDRIO166PB5 (io), U14 DDRIO176PB5 (io), U15 DDRIO176NB5 (io), U16 DDRIO186PB5 (io), U17 DDRIO189NB5 (io), U18 DDRIO190NB5 (io), U19 MSIO0PB3 (io), U20 VSS (power), U21 MSIO4NB3 (io), U22 MSIO4PB3 (io), V1 VSS (power), V2 VSS (power), V3 VSS (power), V4 VSS (power), V5 VSS (power), V6 VSS (power), V7 VSS (power), V8 DNC, V9 VSS (power), V10 VDDI5 (power), V11 DDRIO156PB5 (io), V12 DDRIO159NB5 (io), V13 DDRIO171PB5 (io), V14 DDRIO171NB5 (io), V15 VSS (power), V16 DDRIO184NB5 (io), V17 DDRIO189PB5 (io), V18 DDRIO190PB5 (io), V19 MSIO0NB3 (io), V20 JTAG_TMS/M3_TMS/M3_SWDIO, V21 MSIO3NB3 (io), V22 MSIO3PB3 (io), W1 VSS (power), W2 VSS (power), W3 VSS (power), W4 VSS (power), W5 VSS (power), W6 VSS (power), W7 VSS (power), W8 VSS (power), W9 DDRIO148PB5/PROBE_A (io), W10 DDRIO151PB5 (io), W11 DDRIO156NB5 (io), W12 DDRIO159PB5/CCC_SW1_CLKI3 (io), W13 VDDI5 (power), W14 DDRIO169NB5 (io), W15 DDRIO172NB5 (io), W16 DDRIO184PB5 (io), W17 DDRIO182NB5 (io), W18 VSS (power), W19 DDRIO187NB5 (io), W20 JTAG_TCK/M3_TCK (in), W21 VDDI4 (power), W22 JTAG_TDI/M3_TDI (in), Y1 VSS (power), Y2 VSS (power), Y3 VSS (power), Y4 VSS (power), Y5 VSS (power), Y6 VSS (power), Y7 VSS (power), Y8 VSS (power), Y9 DDRIO148NB5/PROBE_B (io), Y10 DDRIO151NB5 (io), Y11 VSS (power), Y12 DDRIO157NB5 (io), Y13 DDRIO162NB5 (io), Y14 DDRIO169PB5 (io), Y15 DDRIO172PB5 (io), Y16 VDDI5 (power), Y17 DDRIO182PB5 (io), Y18 DDRIO181PB5 (io), Y19 DDRIO181NB5 (io), Y20 DDRIO187PB5 (io), Y21 JTAG_TDO/M3_TDO/M3_SWO (out), Y22 JTAG_TRSTB/M3_TRSTB
part A text: 1 of 5
part B text: 2 of 5
part C text: 3 of 5
part D text: 4 of 5
part E text: 5 of 5

## CMP-022-000000-1
designator U?, comment MR4A16BCYS35R
No Description Available; Manufacturer_Name: Everspin; Copyright: Copyright (C) 2026 Ultra Librarian. All rights reserved.; Type: Type; Manufacturer_Part_Number: MR4A16BCYS35R; RefDes: RefDes; Design Item ID: MR4A16BCYS35R; Source: MR4A16BCYS35R.SchLib
footprint TSOP2-54_EVS
pins: 1 NC, 2 A19 (in), 3 A0 (in), 4 A1 (in), 5 A2 (in), 6 A3 (in), 7 A4 (in), 8 *E (in), 9 DQ0 (io), 10 DQ1 (io), 11 DQ2 (io), 12 DQ3 (io), 13 VDD (power), 14 VSS (power), 15 DQ4 (io), 16 DQ5 (io), 17 DQ6 (io), 18 DQ7 (io), 19 *W (in), 20 A5 (in), 21 A6 (in), 22 A7 (in), 23 A8 (in), 24 A9 (in), 25 NC, 26 NC, 27 NC, 28 NC, 29 NC, 30 NC, 31 A10 (in), 32 A11 (in), 33 A12 (in), 34 A13 (in), 35 A14 (in), 36 DC, 37 DQ8 (io), 38 DQ9 (io), 39 DQ10 (io), 40 DQ11 (io), 41 VDD (power), 42 VSS (power), 43 DQ12 (io), 44 DQ13 (io), 45 DQ14 (io), 46 DQ15 (io), 47 *LB (in), 48 *UB (in), 49 *G (in), 50 A15 (in), 51 A16 (in), 52 A17 (in), 53 A18 (in), 54 NC

## CMP-024-000001-1
designator U?, comment IS43TR16256A-125KBL
No Description Available; Manufacturer_Name: ISSI; Source: IS43TR16256A-125KBL.SchLib; Copyright: Copyright (C) 2026 Ultra Librarian. All rights reserved.; Type: Memory; Design Item ID: IS43TR16256A-125KBL; Manufacturer_Part_Number: IS43TR16256A-125KBL; RefDes: RefDes
footprint BGA96_IS43TR_ISI
pins: A1 VDDQ (power), A2 DQU5 (io), A3 DQU7 (io), A7 DQU4 (in), A8 VDDQ (power), A9 VSS (power), B1 VSSQ (power), B2 VDD (power), B3 VSS (power), B7 DQSU# (io), B8 DQU6 (io), B9 VSSQ (power), C1 VDDQ (power), C2 DQU3 (io), C3 DQU1 (io), C7 DQSU (io), C8 DQU2 (io), C9 VDDQ (power), D1 VSSQ (power), D2 VDDQ (power), D3 DMU (in), D7 DQU0 (io), D8 VSSQ (power), D9 VDD (power), E1 VSS (power), E2 VSSQ (power), E3 DQL0 (io), E7 DML (in), E8 VSSQ (power), E9 VDDQ (power), F1 VDDQ (power), F2 DQL2 (io), F3 DQSL (io), F7 DQL1 (io), F8 DQL3 (io), F9 VSSQ (power), G1 VSSQ (power), G2 DQL6 (io), G3 DQSL# (io), G7 VDD (power), G8 VSS (power), G9 VSSQ (power), H1 VREFDQ (power), H2 VDDQ (power), H3 DQL4 (io), H7 DQL7 (io), H8 DQL5 (io), H9 VDDQ (power), J1 NC, J2 VSS (power), J3 RAS# (in), J7 CK (in), J8 VSS (power), J9 NC, K1 ODT (in), K2 VDD (power), K3 CAS# (in), K7 CK# (in), K8 VDD (power), K9 CKE (in), L1 NC, L2 CS# (in), L3 WE# (in), L7 A10/AP (io), L8 ZQ (power), L9 NC, M1 VSS (power), M2 BA0 (in), M3 BA2 (in), M7 NC(A15), M8 VREFCA (power), M9 VSS (power), N1 VDD (power), N2 A3 (in), N3 A0 (in), N7 A12/BC# (in), N8 BA1 (io), N9 VDD (power), P1 VSS (power), P2 A5 (in), P3 A2 (in), P7 A1 (in), P8 A4 (io), P9 VSS (power), R1 VDD (power), R2 A7 (in), R3 A9 (in), R7 A11 (in), R8 A6 (io), R9 VDD (power), T1 VSS (power), T2 RESET# (in), T3 A13 (in), T7 A14 (in), T8 A8 (io), T9 VSS (power)

## CMP-030-000000-1
designator Y?, comment S3A33025-50.000-L-X-R
Component Type: Standard; Source: S3A33025-50.000-L-X-R.SchLib; MP: S3A33025-50.000-L-X-R; Value: *; Pin Count: 6; Design Item ID: S3A33025-50.000-L-X-R; Package: None; Price: None; Availability: Unavailable
footprint OSC_S3A33025-50.000-L-X-R
pins: 1 ENABLE/DISABLE, 2 NC, 3 GND (power), 4 OUTPUT-Q (out), 5 OUTPUT-QN (out), 6 VDD (power)

## CMP-031-00006-1
designator U?, comment TPS3823-33DBVT
Active-low, push-pull, voltage supervisor (reset IC) with 1.6-s watchdog & manual reset; MF: Texas Instruments; Case/Package: SOT-23-5 Texas Instruments; Value: *; SnapEDA_Link: https://www.snapeda.com/parts/TPS3823-33DBVT/Texas+Instruments/view-part/?ref=snap; Pins: 5; Check_prices: https://www.snapeda.com/parts/TPS3823-33DBVT/Texas+Instruments/view-part/?ref=eda; MP: TPS3823-33DBVT; Source: TPS3823-33DBVT.SchLib; Design Item ID: TPS3823-33DBVT; Component Type: Standard; Component Type: Integrated Circuits
footprint SOT95P280X145-5N
pins: 1 ~{RESET} (out), 2 GND (power), 3 ~{MR} (in), 4 WDI (in), 5 VDD (power)

## CMP-031-00007-1
designator IC?, comment SI4464-B1B-FMR
IC RF TxRx + MCU General ISM < 1GHz - 119MHz ~ 1.05GHz 20-VFQFN Exposed Pad; MF: Silicon Labs; Component Type: Standard; Pins: 21; Check_prices: https://www.snapeda.com/parts/SI4464-B1B-FMR/Silicon+Labs/view-part/?ref=eda; Case/Package: QFN-20 Silicon Labs; SnapEDA_Link: https://www.snapeda.com/parts/SI4464-B1B-FMR/Silicon+Labs/view-part/?ref=snap; Design Item ID: SI4464-B1B-FMR; Source: SI4464-B1B-FMR.SchLib; MP: SI4464-B1B-FMR; Value: *; Component Type: Integrated Circuits
footprint QFN50P400X400X90-21N
pins: 1 SDN (io), 2 RXP (io), 3 RXN (io), 4 TX (io), 5 NC, 6 VDD_1 (io), 7 TXRAMP (io), 8 VDD_2 (io), 9 GPIO0 (io), 10 GPIO1 (io), 11 NIRQ (io), 12 SCLK (io), 13 SDO (io), 14 SDI (io), 15 NSEL (io), 16 XOUT (io), 17 XIN (io), 18 GND_1 (io), 19 GPIO2 (io), 20 GPIO3 (io), 21 GND_2 (io)

## CMP-031-00008-1
designator U?, comment PE4259
RF Switch IC General Purpose SPDT 3 GHz 50Ohm SC-70-6; MF: pSemi; Pins: 6; Value: *; Check_prices: https://www.snapeda.com/parts/PE4259/pSemi/view-part/?ref=eda; Case/Package: SOT-363 Peregrine Semiconductor; SnapEDA_Link: https://www.snapeda.com/parts/PE4259/pSemi/view-part/?ref=snap; Source: PE4259.SchLib; MP: PE4259; Design Item ID: PE4259; Component Type: Standard
footprint SOT65P215X110-6N
pins: 1 RF1, 2 GND (power), 3 RF2, 4 CTRL (in), 5 RFC, 6 ~{CTRL/}VDD (power)

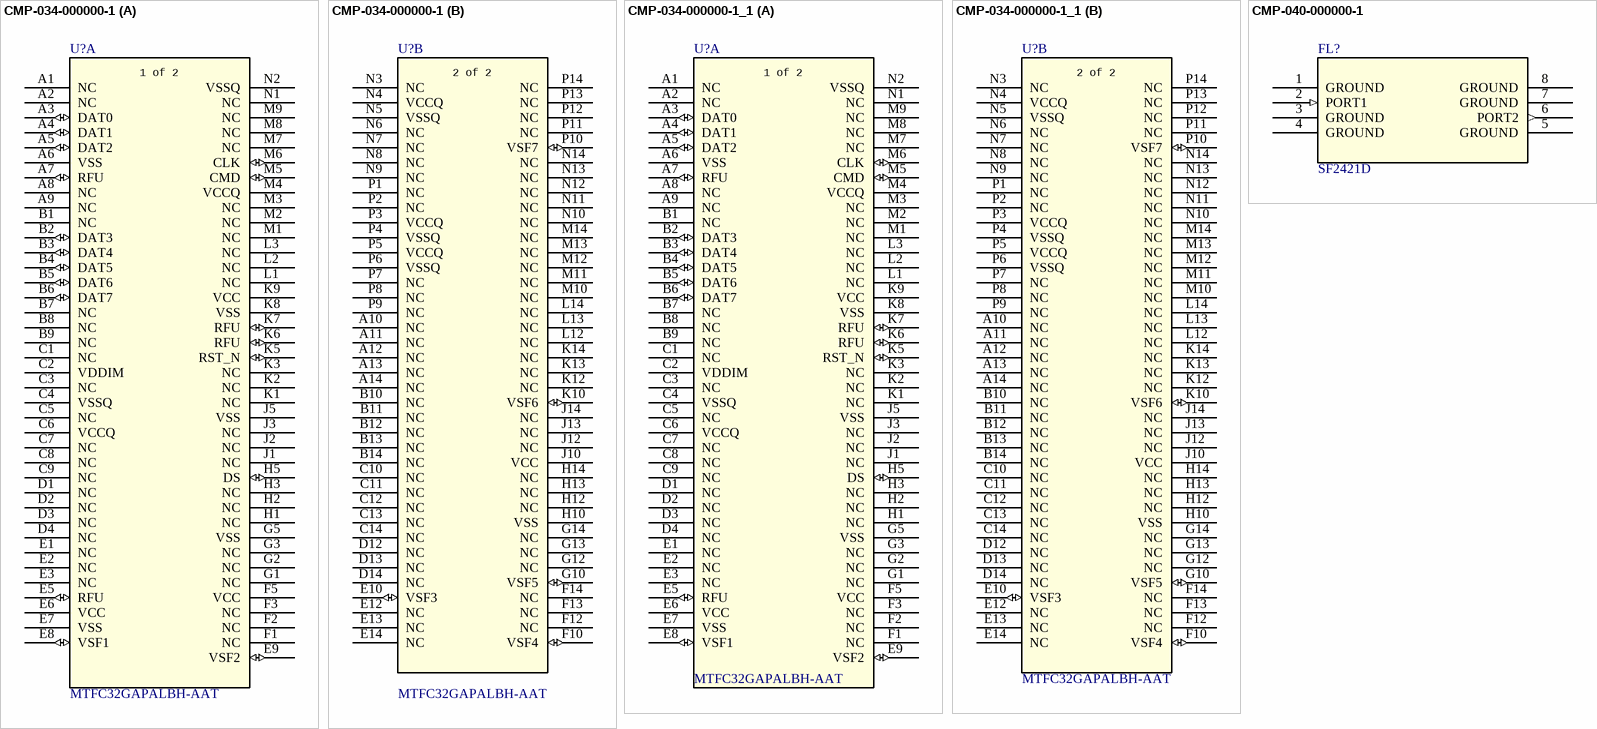
[diagram p6: symbols CMP-034-000000-1 to CMP-040-000000-1]

## CMP-034-000000-1
designator U?, comment MTFC32GAPALBH-AAT
No Description Available; Manufacturer_Name: Micron; Copyright: Copyright (C) 2026 Ultra Librarian. All rights reserved.; Type: Type; Manufacturer_Part_Number: MTFC32GAPALBH-AAT; RefDes: RefDes; Design Item ID: MTFC32GAPALBH-AAT; Source: MTFC32GAPALBH-AAT.SchLib
footprint TFBGA153_11P5X13_MRN
part A pins: A1 NC, A2 NC, A3 DAT0 (io), A4 DAT1 (io), A5 DAT2 (io), A6 VSS (power), A7 RFU (io), A8 NC, A9 NC, B1 NC, B2 DAT3 (io), B3 DAT4 (io), B4 DAT5 (io), B5 DAT6 (io), B6 DAT7 (io), B7 NC, B8 NC, B9 NC, C1 NC, C2 VDDIM (power), C3 NC, C4 VSSQ (power), C5 NC, C6 VCCQ (power), C7 NC, C8 NC, C9 NC, D1 NC, D2 NC, D3 NC, D4 NC, E1 NC, E2 NC, E3 NC, E5 RFU (io), E6 VCC (power), E7 VSS (power), E8 VSF1 (io), E9 VSF2 (io), F1 NC, F2 NC, F3 NC, F5 VCC (power), G1 NC, G2 NC, G3 NC, G5 VSS (power), H1 NC, H2 NC, H3 NC, H5 DS (io), J1 NC, J2 NC, J3 NC, J5 VSS (power), K1 NC, K2 NC, K3 NC, K5 RST_N (io), K6 RFU (io), K7 RFU (io), K8 VSS (power), K9 VCC (power), L1 NC, L2 NC, L3 NC, M1 NC, M2 NC, M3 NC, M4 VCCQ (power), M5 CMD (io), M6 CLK (io), M7 NC, M8 NC, M9 NC, N1 NC, N2 VSSQ (power)
part B pins: A10 NC, A11 NC, A12 NC, A13 NC, A14 NC, B10 NC, B11 NC, B12 NC, B13 NC, B14 NC, C10 NC, C11 NC, C12 NC, C13 NC, C14 NC, D12 NC, D13 NC, D14 NC, E10 VSF3 (io), E12 NC, E13 NC, E14 NC, F10 VSF4 (io), F12 NC, F13 NC, F14 NC, G10 VSF5 (io), G12 NC, G13 NC, G14 NC, H10 VSS (power), H12 NC, H13 NC, H14 NC, J10 VCC (power), J12 NC, J13 NC, J14 NC, K10 VSF6 (io), K12 NC, K13 NC, K14 NC, L12 NC, L13 NC, L14 NC, M10 NC, M11 NC, M12 NC, M13 NC, M14 NC, N3 NC, N4 VCCQ (power), N5 VSSQ (power), N6 NC, N7 NC, N8 NC, N9 NC, N10 NC, N11 NC, N12 NC, N13 NC, N14 NC, P1 NC, P2 NC, P3 VCCQ (power), P4 VSSQ (power), P5 VCCQ (power), P6 VSSQ (power), P7 NC, P8 NC, P9 NC, P10 VSF7 (io), P11 NC, P12 NC, P13 NC, P14 NC
part A text: 1 of 2
part B text: 2 of 2

## CMP-034-000000-1_1
designator U?, comment MTFC32GAPALBH-AAT
No Description Available; Manufacturer_Name: Micron; Copyright: Copyright (C) 2026 Ultra Librarian. All rights reserved.; Type: Type; Manufacturer_Part_Number: MTFC32GAPALBH-AAT; RefDes: RefDes; Design Item ID: MTFC32GAPALBH-AAT; Source: MTFC32GAPALBH-AAT.SchLib
footprint TFBGA153_11P5X13_MRN
part A pins: A1 NC, A2 NC, A3 DAT0 (io), A4 DAT1 (io), A5 DAT2 (io), A6 VSS (power), A7 RFU (io), A8 NC, A9 NC, B1 NC, B2 DAT3 (io), B3 DAT4 (io), B4 DAT5 (io), B5 DAT6 (io), B6 DAT7 (io), B7 NC, B8 NC, B9 NC, C1 NC, C2 VDDIM (power), C3 NC, C4 VSSQ (power), C5 NC, C6 VCCQ (power), C7 NC, C8 NC, C9 NC, D1 NC, D2 NC, D3 NC, D4 NC, E1 NC, E2 NC, E3 NC, E5 RFU (io), E6 VCC (power), E7 VSS (power), E8 VSF1 (io), E9 VSF2 (io), F1 NC, F2 NC, F3 NC, F5 VCC (power), G1 NC, G2 NC, G3 NC, G5 VSS (power), H1 NC, H2 NC, H3 NC, H5 DS (io), J1 NC, J2 NC, J3 NC, J5 VSS (power), K1 NC, K2 NC, K3 NC, K5 RST_N (io), K6 RFU (io), K7 RFU (io), K8 VSS (power), K9 VCC (power), L1 NC, L2 NC, L3 NC, M1 NC, M2 NC, M3 NC, M4 VCCQ (power), M5 CMD (io), M6 CLK (io), M7 NC, M8 NC, M9 NC, N1 NC, N2 VSSQ (power)
part B pins: A10 NC, A11 NC, A12 NC, A13 NC, A14 NC, B10 NC, B11 NC, B12 NC, B13 NC, B14 NC, C10 NC, C11 NC, C12 NC, C13 NC, C14 NC, D12 NC, D13 NC, D14 NC, E10 VSF3 (io), E12 NC, E13 NC, E14 NC, F10 VSF4 (io), F12 NC, F13 NC, F14 NC, G10 VSF5 (io), G12 NC, G13 NC, G14 NC, H10 VSS (power), H12 NC, H13 NC, H14 NC, J10 VCC (power), J12 NC, J13 NC, J14 NC, K10 VSF6 (io), K12 NC, K13 NC, K14 NC, L12 NC, L13 NC, L14 NC, M10 NC, M11 NC, M12 NC, M13 NC, M14 NC, N3 NC, N4 VCCQ (power), N5 VSSQ (power), N6 NC, N7 NC, N8 NC, N9 NC, N10 NC, N11 NC, N12 NC, N13 NC, N14 NC, P1 NC, P2 NC, P3 VCCQ (power), P4 VSSQ (power), P5 VCCQ (power), P6 VSSQ (power), P7 NC, P8 NC, P9 NC, P10 VSF7 (io), P11 NC, P12 NC, P13 NC, P14 NC
part A text: 1 of 2
part B text: 2 of 2

## CMP-040-000000-1
designator FL?, comment SF2421D
No Description Available; Manufacturer_Name: RFMi; Source: SF2421D.SchLib; RefDes: RefDes; Copyright: Copyright (C) 2026 Ultra Librarian. All rights reserved.; Type: SAW Filters; Design Item ID: SF2421D; Manufacturer_Part_Number: SF2421D; Component Type: Filters
footprint SM3838-8_RFI
pins: 1 GROUND (power), 2 PORT1 (in), 3 GROUND (power), 4 GROUND (power), 5 GROUND (power), 6 PORT2 (out), 7 GROUND (power), 8 GROUND (power)

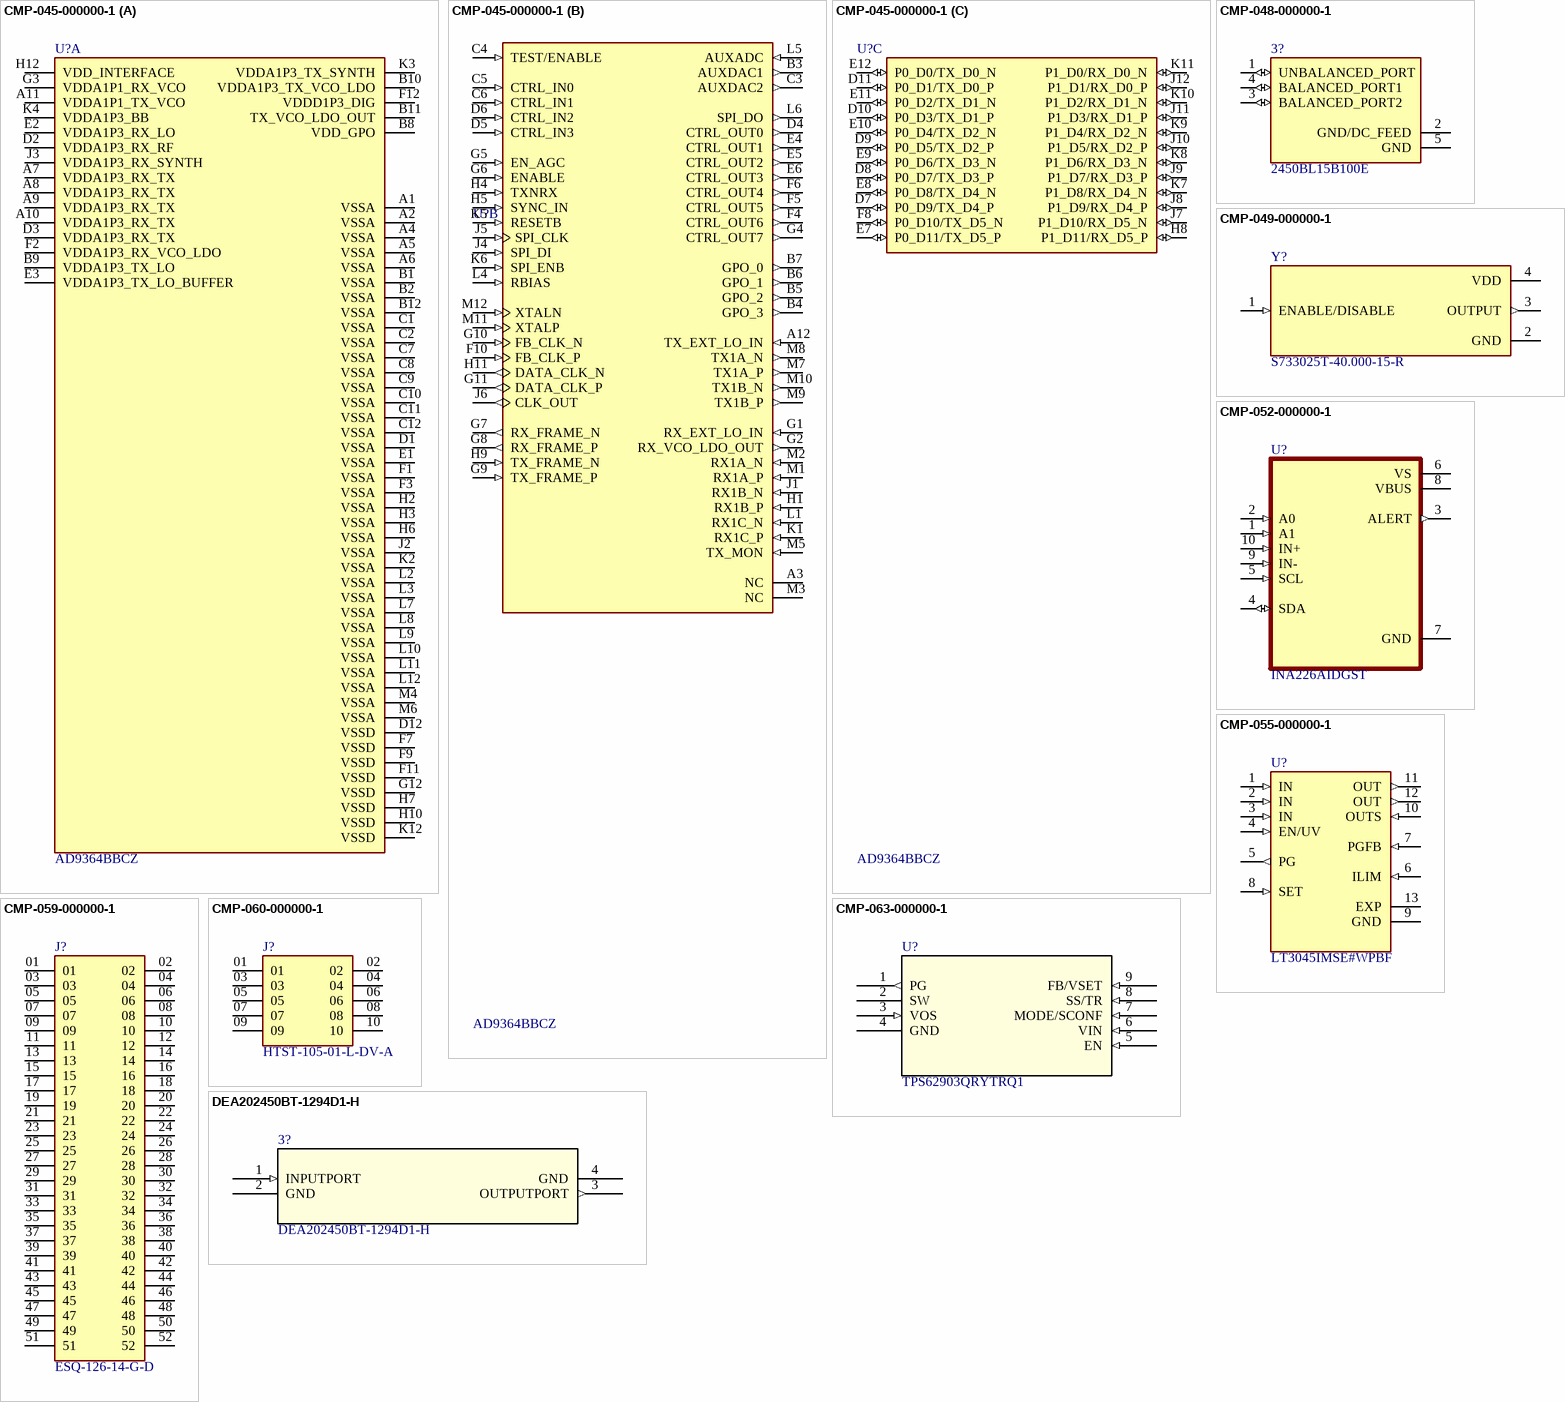
[diagram p7: symbols CMP-045-000000-1 to DEA202450BT-1294D1-H]

## CMP-045-000000-1
designator U?, comment AD9364BBCZ
1 x 1 RF Agile Transceiver; MF: Analog Devices; Component Type: Standard; SnapEDA_Link: https://www.snapeda.com/parts/AD9364BBCZ/Analog+Devices/view-part/?ref=snap; Check_prices: https://www.snapeda.com/parts/AD9364BBCZ/Analog+Devices/view-part/?ref=eda; Pin Count: 144; Value: *; Package: CSPBGA -144 Analog Devices; Design Item ID: AD9364BBCZ; MP: AD9364BBCZ; Source: AD9364BBCZ.SchLib
footprint BGA144C80P12X12_1000X1000X170N
part A pins: A1 VSSA (power), A2 VSSA (power), A4 VSSA (power), A5 VSSA (power), A6 VSSA (power), A7 VDDA1P3_RX_TX (power), A8 VDDA1P3_RX_TX (power), A9 VDDA1P3_RX_TX (power), A10 VDDA1P3_RX_TX (power), A11 VDDA1P1_TX_VCO (power), B1 VSSA (power), B2 VSSA (power), B8 VDD_GPO (power), B9 VDDA1P3_TX_LO (power), B10 VDDA1P3_TX_VCO_LDO (power), B11 TX_VCO_LDO_OUT (power), B12 VSSA (power), C1 VSSA (power), C2 VSSA (power), C7 VSSA (power), C8 VSSA (power), C9 VSSA (power), C10 VSSA (power), C11 VSSA (power), C12 VSSA (power), D1 VSSA (power), D2 VDDA1P3_RX_RF (power), D3 VDDA1P3_RX_TX (power), D12 VSSD (power), E1 VSSA (power), E2 VDDA1P3_RX_LO (power), E3 VDDA1P3_TX_LO_BUFFER (power), F1 VSSA (power), F2 VDDA1P3_RX_VCO_LDO (power), F3 VSSA (power), F7 VSSD (power), F9 VSSD (power), F11 VSSD (power), F12 VDDD1P3_DIG (power), G3 VDDA1P1_RX_VCO (power), G12 VSSD (power), H2 VSSA (power), H3 VSSA (power), H6 VSSA (power), H7 VSSD (power), H10 VSSD (power), H12 VDD_INTERFACE (power), J2 VSSA (power), J3 VDDA1P3_RX_SYNTH (power), K2 VSSA (power), K3 VDDA1P3_TX_SYNTH (power), K4 VDDA1P3_BB (power), K12 VSSD (power), L2 VSSA (power), L3 VSSA (power), L7 VSSA (power), L8 VSSA (power), L9 VSSA (power), L10 VSSA (power), L11 VSSA (power), L12 VSSA (power), M4 VSSA (power), M6 VSSA (power)
part B pins: A3 NC, A12 TX_EXT_LO_IN (in), B3 AUXDAC1 (out), B4 GPO_3 (out), B5 GPO_2 (out), B6 GPO_1 (out), B7 GPO_0 (out), C3 AUXDAC2 (out), C4 TEST/ENABLE (in), C5 CTRL_IN0 (in), C6 CTRL_IN1 (in), D4 CTRL_OUT0 (out), D5 CTRL_IN3 (in), D6 CTRL_IN2 (in), E4 CTRL_OUT1 (out), E5 CTRL_OUT2 (out), E6 CTRL_OUT3 (out), F4 CTRL_OUT6 (out), F5 CTRL_OUT5 (out), F6 CTRL_OUT4 (out), F10 FB_CLK_P (in), G1 RX_EXT_LO_IN (in), G2 RX_VCO_LDO_OUT (out), G4 CTRL_OUT7 (out), G5 EN_AGC (in), G6 ENABLE (in), G7 RX_FRAME_N (out), G8 RX_FRAME_P (out), G9 TX_FRAME_P (in), G10 FB_CLK_N (in), G11 DATA_CLK_P (out), H1 RX1B_P (in), H4 TXNRX (in), H5 SYNC_IN (in), H9 TX_FRAME_N (in), H11 DATA_CLK_N (out), J1 RX1B_N (in), J4 SPI_DI (in), J5 SPI_CLK (in), J6 CLK_OUT (out), K1 RX1C_P (in), K5 RESETB (in), K6 SPI_ENB (in), L1 RX1C_N (in), L4 RBIAS (in), L5 AUXADC (in), L6 SPI_DO (out), M1 RX1A_P (in), M2 RX1A_N (in), M3 NC, M5 TX_MON (in), M7 TX1A_P (out), M8 TX1A_N (out), M9 TX1B_P (out), M10 TX1B_N (out), M11 XTALP (in), M12 XTALN (in)
part C pins: D7 P0_D9/TX_D4_P (io), D8 P0_D7/TX_D3_P (io), D9 P0_D5/TX_D2_P (io), D10 P0_D3/TX_D1_P (io), D11 P0_D1/TX_D0_P (io), E7 P0_D11/TX_D5_P (io), E8 P0_D8/TX_D4_N (io), E9 P0_D6/TX_D3_N (io), E10 P0_D4/TX_D2_N (io), E11 P0_D2/TX_D1_N (io), E12 P0_D0/TX_D0_N (io), F8 P0_D10/TX_D5_N (io), H8 P1_D11/RX_D5_P (io), J7 P1_D10/RX_D5_N (io), J8 P1_D9/RX_D4_P (io), J9 P1_D7/RX_D3_P (io), J10 P1_D5/RX_D2_P (io), J11 P1_D3/RX_D1_P (io), J12 P1_D1/RX_D0_P (io), K7 P1_D8/RX_D4_N (io), K8 P1_D6/RX_D3_N (io), K9 P1_D4/RX_D2_N (io), K10 P1_D2/RX_D1_N (io), K11 P1_D0/RX_D0_N (io)

## CMP-048-000000-1
designator 3?, comment 2450BL15B100E
RF Balun 2.4GHz ~ 2.5GHz 50 / 100Ohm 0805 (2012 Metric); MF: Johanson Technology; Digi-Key_Part_Number: 712-1041-1-ND; MP: 2450BL15B100E; Design Item ID: 2450BL15B100E; Source: 2450BL15B100E.SchLib; SnapEDA_Link: https://www.snapeda.com/parts/2450BL15B100E/Johanson%20Technology%20Inc./view-part/512836/?ref=snap; Package: 0805 Johanson; Purchase-URL: https://pricing.snapeda.com/search/part/2450BL15B100E/?ref=eda; Component Type: Standard; Value: *; Pin Count: 5; Check_prices: https://www.snapeda.com/parts/2450BL15B100E/Johanson%20Technology%20Inc./view-part/512836/?ref=eda
footprint BALUN_2450BL15B100E
pins: 1 UNBALANCED_PORT (io), 2 GND/DC_FEED (power), 3 BALANCED_PORT2 (io), 4 BALANCED_PORT1 (io), 5 GND (power)

## CMP-049-000000-1
designator Y?, comment S733025T-40.000-15-R
Package: None; MP: S733025T-40.000-15-R; Pin Count: 4; Value: *; Component Type: Standard; Source: S733025T-40.000-15-R.SchLib; Availability: Unavailable; Design Item ID: S733025T-40.000-15-R; Price: None
footprint OSC_S733025T-40.000-15-R
pins: 1 ENABLE/DISABLE (in), 2 GND (power), 3 OUTPUT (out), 4 VDD (power)

## CMP-052-000000-1
designator U?, comment INA226AIDGST
36V, 16-bit, ultra-precise i2c output current/voltage/power monitor w/alert; MF: Texas Instruments; Design Item ID: INA226AIDGST; MP: INA226AIDGST; Check_prices: https://www.snapeda.com/parts/INA226AIDGST/Texas+Instruments/view-part/?ref=eda; Component Type: Standard; SnapEDA_Link: https://www.snapeda.com/parts/INA226AIDGST/Texas+Instruments/view-part/?ref=snap; Pin Count: 10; Package: VSSOP-10 Texas Instruments; Value: *; Source: INA226AIDGST.SchLib
footprint SOP50P490X110-10N
pins: 1 A1 (in), 2 A0 (in), 3 ALERT (out), 4 SDA (io), 5 SCL (in), 6 VS (power), 7 GND (power), 8 VBUS (power), 9 IN- (in), 10 IN+ (in)

## CMP-055-000000-1
designator U?, comment LT3045IMSE#WPBF
20V, 500mA, Ultralow Noise, Ultrahigh PSRR Linear Regulator; MF: Analog Devices; SnapEDA_Link: https://www.snapeda.com/parts/LT3045IMSE%23WPBF/Analog+Devices/view-part/?ref=snap; Design Item ID: LT3045IMSE#WPBF; Package: MSOP -12 Analog Devices; Pin Count: 13; Value: *; MP: LT3045IMSE#WPBF; Component Type: Standard; Source: LT3045IMSE#WPBF.SchLib; Check_prices: https://www.snapeda.com/parts/LT3045IMSE%23WPBF/Analog+Devices/view-part/?ref=eda
footprint SOP65P490X110-13N
pins: 1 IN (in), 2 IN (in), 3 IN (in), 4 EN/UV (in), 5 PG (out), 6 ILIM (in), 7 PGFB (in), 8 SET (in), 9 GND (power), 10 OUTS (in), 11 OUT (out), 12 OUT (out), 13 EXP (power)

## CMP-059-000000-1
designator J?, comment ESQ-126-14-G-D
MF: Samtec; Price: None; Value: *; Design Item ID: ESQ-126-14-G-D; Package: None; Source: SnapEDAsch.SchLib; MP: ESQ-126-14-G-D; Availability: Unavailable; Component Type: Standard; Pin Count: 52
footprint SAMTEC_ESQ-126-14-G-D
pins: 01, 02, 03, 04, 05, 06, 07, 08, 09, 10, 11, 12, 13, 14, 15, 16, 17, 18, 19, 20, 21, 22, 23, 24, 25, 26, 27, 28, 29, 30, 31, 32, 33, 34, 35, 36, 37, 38, 39, 40, 41, 42, 43, 44, 45, 46, 47, 48, 49, 50, 51, 52

## CMP-060-000000-1
designator J?, comment HTST-105-01-L-DV-A
MF: Samtec Inc.; Value: *; Package: None; Source: HTST-105-01-L-DV-A.SchLib; Price: None; MP: HTST-105-01-L-DV-A; Component Type: Standard; Pin Count: 10; Availability: Unavailable; Design Item ID: HTST-105-01-L-DV-A
footprint SAMTEC_HTST-105-01-L-DV-A
pins: 01, 02, 03, 04, 05, 06, 07, 08, 09, 10

## CMP-063-000000-1
designator U?, comment TPS62903QRYTRQ1
Automotive, 3-V to 18-V, 3-A low-IQ synchronous buck converter with 165Â°C junction temperature 9-VQFN-HR -40 to 165; Manufacturer_Name: Texas Instruments; RefDes: RefDes; Source: TPS62903QRYTRQ1.SchLib; Type: Power Management; Design Item ID: TPS62903QRYTRQ1; Copyright: Copyright (C) 2026 Ultra Librarian. All rights reserved.; Manufacturer_Part_Number: TPS62903QRYTRQ1
footprint VQFNHR9_RYT_TEX
pins: 1 PG (out), 2 SW (power), 3 VOS (in), 4 GND (power), 5 EN (in), 6 VIN (in), 7 MODE/SCONF (in), 8 SS/TR (in), 9 FB/VSET (in)

## DEA202450BT-1294D1-H
designator 3?
No Description Available; Manufacturer_Name: TDK; Type: RF Filters; Copyright: Copyright (C) 2026 Ultra Librarian. All rights reserved.; Manufacturer_Part_Number: DEA202450BT-1294D1-H; RefDes: RefDes
footprint SMD4_DEA202450BT-0805_TDK
pins: 1 INPUTPORT (in), 2 GND (power), 3 OUTPUTPORT (out), 4 GND (power)